# Altium schematic symbol library Schlib1.SchLib: 108 symbols (part 2 of 2)
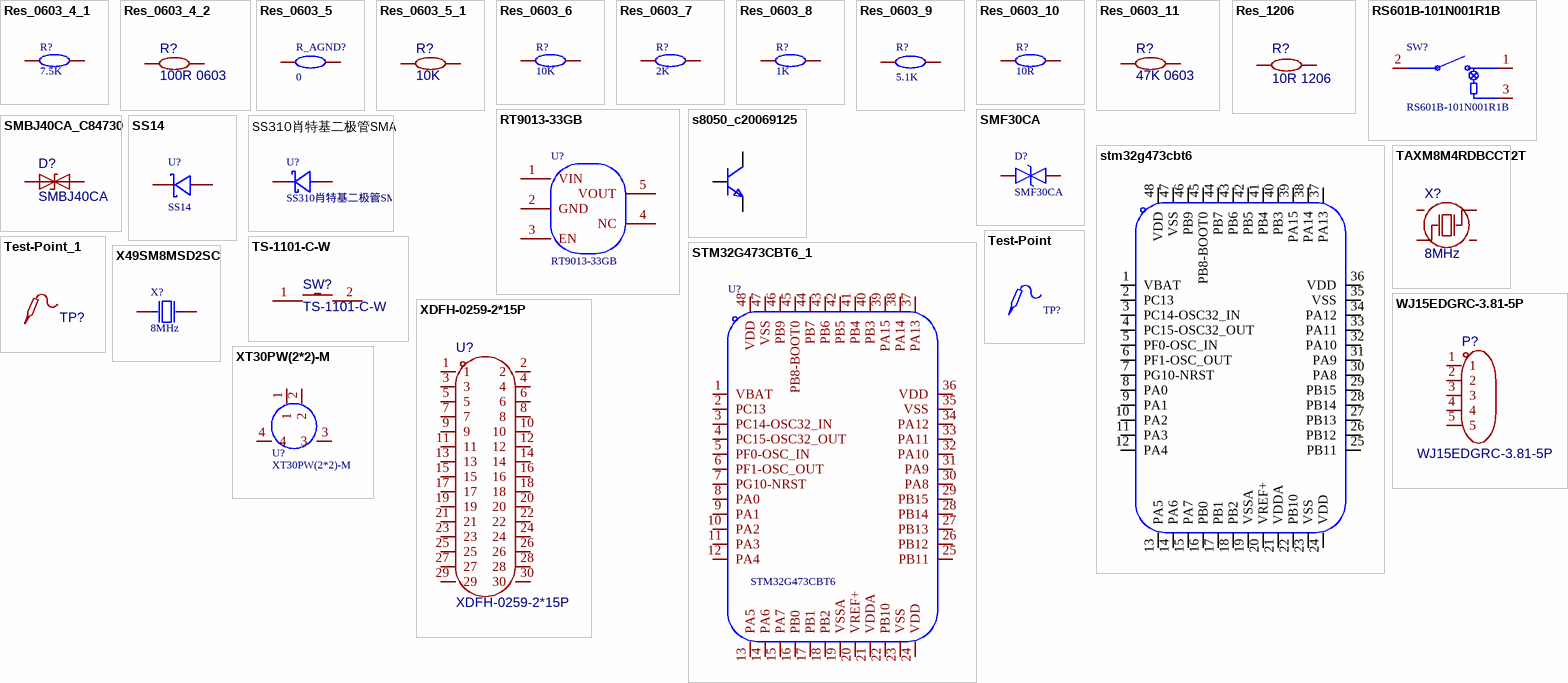
[diagram p3: symbols Res_0603_4_1 to XT30PW(2*2)-M]

## Res_0603_4_2
designator R?, comment 100R 0603
Symbol: 电阻; Device: Res_0603; ConvertToPcb: yes; ModelId: fc143cca1e79419f9cd78b61e9279f08; ModelName: R0603; ModelTransform: 31.8897,63.7794,0,90,0,0,0,0,0; Value: 100R 0603; AddInBom: yes; Supplier Footprint: 0603; FootprintName: R0603
footprint R0603
pins: 1, 2

## Res_0603_5
designator R_AGND?, comment 0
Symbol: 电阻; Device: Res_0603; 3D Model: fc143cca1e79419f9cd78b61e9279f08聨0819f05c4eef4c71ace90d822a990e87; 3D Model Transform: 31.8897,63.7794,0,90,0,0,0,0,0; ConvertToPcb: yes; ModelName: R0603; Supplier Footprint: 0603; Value: 0; AddInBom: yes; FootprintName: R0603
footprint R0603
3D model R0603
pins: 1, 2

## Res_0603_5_1
designator R?, comment 10K
Symbol: 电阻; Device: Res_0603; ConvertToPcb: yes; ModelId: fc143cca1e79419f9cd78b61e9279f08; ModelName: R0603; ModelTransform: 31.8897,63.7794,0,90,0,0,0,0,0; AddInBom: yes; Supplier Footprint: 0603; FootprintName: R0603; Value: 10K
footprint R0603
pins: 1, 2

## Res_0603_6
designator R?, comment 10K
Symbol: 电阻; Device: Res_0603; 3D Model: fc143cca1e79419f9cd78b61e9279f08聨0819f05c4eef4c71ace90d822a990e87; 3D Model Transform: 31.8897,63.7794,0,90,0,0,0,0,0; ConvertToPcb: yes; ModelName: R0603; Supplier Footprint: 0603; Value: 10K; AddInBom: yes; FootprintName: R0603
footprint R0603
3D model R0603
pins: 1, 2

## Res_0603_7
designator R?, comment 2K
Symbol: 电阻; Device: Res_0603; 3D Model: fc143cca1e79419f9cd78b61e9279f08聨0819f05c4eef4c71ace90d822a990e87; 3D Model Transform: 31.8897,63.7794,0,90,0,0,0,0,0; ConvertToPcb: yes; ModelName: R0603; Supplier Footprint: 0603; Value: 2K; AddInBom: yes; FootprintName: R0603
footprint R0603
3D model R0603
pins: 1, 2

## Res_0603_8
designator R?, comment 1K
Symbol: 电阻; Device: Res_0603; 3D Model: fc143cca1e79419f9cd78b61e9279f08聨0819f05c4eef4c71ace90d822a990e87; 3D Model Transform: 31.8897,63.7794,0,90,0,0,0,0,0; ConvertToPcb: yes; ModelName: R0603; Supplier Footprint: 0603; Value: 1K; AddInBom: yes; FootprintName: R0603
footprint R0603
3D model R0603
pins: 1, 2

## Res_0603_9
designator R?, comment 5.1K
Symbol: 电阻; Device: Res_0603; 3D Model: fc143cca1e79419f9cd78b61e9279f08聨0819f05c4eef4c71ace90d822a990e87; 3D Model Transform: 31.8897,63.7794,0,90,0,0,0,0,0; ConvertToPcb: yes; ModelName: R0603; Supplier Footprint: 0603; Value: 5.1K; AddInBom: yes; FootprintName: R0603
footprint R0603
3D model R0603
pins: 1, 2

## Res_0603_10
designator R?, comment 10R
Symbol: 电阻; Device: Res_0603; 3D Model: fc143cca1e79419f9cd78b61e9279f08聨0819f05c4eef4c71ace90d822a990e87; 3D Model Transform: 31.8897,63.7794,0,90,0,0,0,0,0; ConvertToPcb: yes; ModelName: R0603; Supplier Footprint: 0603; Value: 10R; AddInBom: yes; FootprintName: R0603
footprint R0603
3D model R0603
pins: 1, 2

## Res_0603_11
designator R?, comment 47K 0603
Symbol: 电阻; Device: Res_0603; ConvertToPcb: yes; ModelId: fc143cca1e79419f9cd78b61e9279f08; ModelName: R0603; ModelTransform: 31.8897,63.7794,0,90,0,0,0,0,0; Value: 47K 0603; AddInBom: yes; Supplier Footprint: 0603; FootprintName: R0603
footprint R0603
pins: 1, 2

## Res_1206
designator R?, comment 10R 1206
Device: Res_1206; AddInBom: yes; SymbolName: 电阻; ModelId: 89a1f13db2384da588040e0b3c55bf66; ModelName: R1206_L3.2-W1.6-H0.6; ModelTransform: 125.984,62.992,0,0,0,0,0,0,0; Value: 10R 1206; Supplier Footprint: 1206; ConvertToPcb: yes; FootprintName: R1206
footprint R1206
pins: 1, 2

## RS601B-101N001R1B
designator SW?
带灯:-;引脚样式:焊片;额定电流:6A;额定电压(AC):250V;额定电压(DC):-;电路结构:单刀单掷;工作寿命:1万次;; Manufacturer: HCTL(华灿天禄); AddInBom: yes; ModelId: 7c41611d110e4d3795e593475e88af54聨0819f05c4eef4c71ace90d822a990e87; ModelName: SW-TH_RS601B-101N011R1B; ModelTransform: 842.738,590.55,0,0,0,0,0.001,0,-275.591; Switch Height: 14.2mm; Actuator Type: 凹面弯曲; Actuator Color: 红色; Current Rating: 6A; Voltage Rating (AC): 250V; Circuit: 单刀单掷; Life: 1万次; Actuator Identifier: - O; Symbol: RS601B-101N001R1B; Device: RS601B-101N001R1B; LCSC Part Name: RS601B-101N001R1B; SupplierPart: C2885786; ManufacturerPart: RS601B-101N001R1B; Supplier Footprint: 插件,21x15mm; JLCPCB Part Class: Extended Part; Datasheet: https://item.szlcsc.com/datasheet/RS601B-101N001R1B/3096688.html; Supplier: LCSC; ConvertToPcb: yes; FootprintName: SW-TH_RS601B-101N011R1B; Length: 21mm; Width: 15mm; With Lamp: -; Termination Style: 焊片; Voltage Rating (DC): -; Operating Temperature: -25℃~+85℃
footprint SW-TH_RS601B-101N011R1B
pins: 1, 2, 3

## RT9013-33GB
designator U?
输出极性:正极;工作电压:5.5V;输出电压:3.3V;输出电流:500mA;电源纹波抑制比(PSRR):50dB@(10kHz);输出类型:固定;; Manufacturer: RICHTEK(立锜); 3D Model: 0a2a1b8f50944f73965918ad6e5fe167聨0819f05c4eef4c71ace90d822a990e87; 3D Model Transform: 118.60433,114.173,0,90,0,0,0.0005,0.0005,0; Output Configuration: 正极; Voltage - Supply: 5.5V; Output Voltage: 3.3V; Output Current: 500mA; Voltage Dropout: 400mV@(500mA); standby current: 25uA; Noise: 30uVrms; Output Type: 固定; Number of Outputs: 1; AddInBom: yes; ModelName: SOT-23-5_L2.9-W1.6-H1.1-LS2.8-P0.95; Symbol: RT9013-33GB; Device: RT9013-33GB; LCSC Part Name: 3.3V 500mA 5.5V; Supplier Part: C47773; Manufacturer Part: RT9013-33GB; Supplier Footprint: SOT-23-5; JLCPCB Part Class: Extended Part; Datasheet: https://item.szlcsc.com/datasheet/RT9013-33GB/48778.html; Supplier: LCSC; Power Supply Rejection Ratio (PSRR): 50dB@(10kHz); Features: 使能控制；短路保护；过流保护；热关断; Operating Temperature: -40℃~+125℃@(Tj); ConvertToPcb: yes; FootprintName: SOT-23-5_L3.0-W1.7-P0.95-LS2.8-BL
footprint SOT-23-5_L3.0-W1.7-P0.95-LS2.8-BL
3D model SOT-23-5_L2.9-W1.6-H1.1-LS2.8-P0.95
pins: 1 VIN, 2 GND, 3 EN, 4 NC, 5 VOUT

## s8050_c20069125
designator Q??  (value not drawn)
晶体管类型:NPN;集电极电流(Ic):500mA;集射极击穿电压(Vceo):25V;耗散功率(Pd):300mW;直流电流增益(hFE):120;; Manufacturer: R+O(宏嘉诚); ManufacturerPart: S8050; AddInBom: yes; ModelId: 5504beb8757f4de79731898ec55d3e54; ModelName: SOT-23-3_L2.9-W1.3-P1.90-LS2.3-BR; ModelTransform: 114.173,90.551,0,90,0,0,0,0,0; type: NPN; Current - Collector(Ic): 500mA; Collector - Emitter Voltage VCEO: 25V; Pd - Power Dissipation: 300mW; DC Current Gain: 120; Transition frequency(fT): 100MHz; Current - Collector Cutoff: 100nA; Vce Saturation(VCE(sat)): 600mV; Emitter-Base Voltage(Vebo): 5V; Number: 1个NPN; Configuration: 独立式; Symbol: S8050_C20069125; LCSC Part Name: hFE:200-350，丝印:J3Y NPN 500mA 25V; SupplierPart: C20069125; Supplier Footprint: SOT-23; JLCPCB Part Class: Extended Part; Datasheet: https://item.szlcsc.com/datasheet/S8050/21397163.html; Supplier: LCSC; ConvertToPcb: yes; FootprintName: SOT-23-3_L2.9-W1.3-P1.90-LS2.3-BR; Operating Temperature: -55℃~+150℃
footprint SOT-23-3_L2.9-W1.3-P1.90-LS2.3-BR
pins: 1 B, 2 E, 3 C

## SMBJ40CA_C84730
designator D?, comment SMBJ40CA
极性:双向;反向截止电压(Vrwm):40V;钳位电压:64.5V;峰值脉冲电流(Ipp):9.3A;峰值脉冲功率(Ppp):600W@10/1000us;击穿电压:44.4V;; Manufacturer: Brightking(君耀电子); Symbol: SMBJ40CA-C84730; Device: SMBJ40CA_C84730; AddInBom: yes; ModelId: 07b8d28694b84373acb83e050c4644c9; ModelName: SMB_L4.6-W3.6-LS5.3-BI; ModelTransform: 212.598,141.732,0,0,0,0,0,0,0; Polarity: 双向; Reverse Stand-Off Voltage (Vrwm): 40V; Clamping Voltage: 64.5V; Peak Pulse Current (Ipp): 9.3A; Voltage - Breakdown: 44.4V; Reverse Leakage Current (Ir): 1uA; Type: TVS; LCSC Part Name: 双向TVS 40V截止 峰值脉冲电流：9.3A; SupplierPart: C84730; ManufacturerPart: SMBJ40CA; Supplier Footprint: SMB(DO-214AA); JLCPCB Part Class: 扩展库; Datasheet: https://item.szlcsc.com/datasheet/SMBJ40CA/85901.html; Supplier: LCSC; ConvertToPcb: yes; FootprintName: SMB_L4.6-W3.6-LS5.3-BI; Peak Pulse Power Dissipation (Ppp): 600W@10/1000us
footprint SMB_L4.6-W3.6-LS5.3-BI
pins: 1, 2

## SMF30CA
designator D?
反向截止电压(Vrwm):30V;最大钳位电压:48.4V;峰值脉冲电流(Ipp):4.2A;击穿电压:33.3V;; Manufacturer: AnBon(安邦); Symbol: SMF30CA_C435498; 3D Model: 8576f175c34f41329e79954aa68cc529聨0819f05c4eef4c71ace90d822a990e87; 3D Model Transform: 145.669,70.866,0,0,0,0,0,0,0; Reverse Stand-Off Voltage (Vrwm): 30V; Maximum Clamping Voltage: 48.4V; Peak Pulse Current (Ipp): 4.2A; Breakdown Voltage: 33.3V; Reverse Leakage Current (Ir): 5uA; Type: TVS; AddInBom: yes; ModelName: SOD-123_L2.7-W1.8-LS3.7-BI; Device: SMF30CA; LCSC Part Name: SMF30CA; Supplier Part: C435498; Manufacturer Part: SMF30CA; Supplier Footprint: SOD-123; JLCPCB Part Class: Extended Part; Datasheet: https://atta.szlcsc.com/upload/public/pdf/source/20191009/C435508_DB7B75E48DB0811659B52C5D7F67F4F0.pdf; Supplier: LCSC; ConvertToPcb: yes; FootprintName: SOD-123_L2.7-W1.8-LS3.7-BI
footprint SOD-123_L2.7-W1.8-LS3.7-BI
3D model SOD-123_L2.7-W1.8-LS3.7-BI
pins: 1, 2

## SS14
designator U?
Symbol: SS14_C9900017063; 3D Model: 0f2f330c645944df9245ac3c3fec3456聨0819f05c4eef4c71ace90d822a990e87; 3D Model Transform: 98.425,49.2125,0,0,0,0,0,0,0; AddInBom: yes; ModelName: SOD-323_L1.7-W1.3-LS2.5-FD; Device: SS14; LCSC Part Name: SS14; Supplier Part: C9900017063; Manufacturer Part: SS14; Supplier Footprint: SOD-323; JLCPCB Part Class: Extended Part; Supplier: LCSC; ConvertToPcb: yes; FootprintName: SOD-323_L1.7-W1.3-LS2.5-RD
footprint SOD-323_L1.7-W1.3-LS2.5-RD
3D model SOD-323_L1.7-W1.3-LS2.5-FD
pins: 1 K, 2 A

## SS310肖特基二极管SMA
designator U?
3D Model: 6890bb9641474820a71fce2135ca3aaa聨0819f05c4eef4c71ace90d822a990e87; 3D Model Transform: 194.8815,98.425,0,0,0,0,0,0,0; AddInBom: yes; ModelName: SMA_L4.3-W2.6-LS5.1-R-RD; Symbol: SS310肖特基二极管SMA; Device: SS310肖特基二极管SMA; LCSC Part Name: SS310肖特基二极管SMA; Supplier Part: C9900014981; Manufacturer Part: SS310肖特基二极管SMA; Supplier Footprint: SS310SMA110V; JLCPCB Part Class: Extended Part; Supplier: LCSC; ConvertToPcb: yes; FootprintName: SMA_L4.3-W2.6-LS5.1-R-RD
footprint SMA_L4.3-W2.6-LS5.1-R-RD
3D model SMA_L4.3-W2.6-LS5.1-R-RD
pins: 1 A, 2 K

## stm32g473cbt6
designator U??  (value not drawn)
CPU内核:ARM Cortex-M4;CPU最大主频:170MHz;CPU位数:32 Bit;; Manufacturer: ST(意法半导体); AddInBom: yes; ModelId: 093be70396ff421eb2cdb946d5311efc; ModelName: LQFP-48_L7.0-W7.0-H1.4-LS9.0-P0.50; ModelTransform: 354.331,354.331,0,0,0,0,0,0,0; CPU Maximum Speed: 170MHz; Core Size: 32 Bit; Program Storage Size: 128KB; Program Memory Type: FLASH; Number of I/O: 38; Oscillator Type: 内置+外置; Voltage - Supply: 1.71V~3.6V; Symbol: STM32G473CBT6; LCSC Part Name: 带DSP和FPU的170MHz主流ARM Cortex-M4 MCU，具有128 KB Flash存储器、数学加速器和高模拟电平集成; SupplierPart: C730111; ManufacturerPart: STM32G473CBT6; Supplier Footprint: LQFP-48(7x7); JLCPCB Part Class: Extended Part; Datasheet: https://item.szlcsc.com/datasheet/STM32G473CBT6/778066.html; Supplier: LCSC; ConvertToPcb: yes; FootprintName: LQFP-48_L7.0-W7.0-P0.50-LS9.0-BL; CPU Core: ARM Cortex-M4; RAM Size: 128KB; EEPROM: -; Operating Temperature: -40℃~+85℃
footprint LQFP-48_L7.0-W7.0-P0.50-LS9.0-BL
pins: 1 VBAT, 2 PC13, 3 PC14-OSC32_IN, 4 PC15-OSC32_OUT, 5 PF0-OSC_IN, 6 PF1-OSC_OUT, 7 PG10-NRST, 8 PA0, 9 PA1, 10 PA2, 11 PA3, 12 PA4, 13 PA5, 14 PA6, 15 PA7, 16 PB0, 17 PB1, 18 PB2, 19 VSSA, 20 VREF+, 21 VDDA, 22 PB10, 23 VSS, 24 VDD, 25 PB11, 26 PB12, 27 PB13, 28 PB14, 29 PB15, 30 PA8, 31 PA9, 32 PA10, 33 PA11, 34 PA12, 35 VSS, 36 VDD, 37 PA13, 38 PA14, 39 PA15, 40 PB3, 41 PB4, 42 PB5, 43 PB6, 44 PB7, 45 PB8-BOOT0, 46 PB9, 47 VSS, 48 VDD

## STM32G473CBT6_1
designator U?, comment STM32G473CBT6
CPU内核:ARM Cortex-M4;CPU最大主频:170MHz;CPU位数:32 Bit;; Manufacturer: ST(意法半导体); 3D Model: 093be70396ff421eb2cdb946d5311efc聨0819f05c4eef4c71ace90d822a990e87; 3D Model Transform: 354.331,354.331,0,0,0,0,0,0,0; CPU Maximum Speed: 170MHz; Core Size: 32 Bit; Program Storage Size: 128KB; Program Memory Type: FLASH; Number of I/O: 38; Oscillator Type: 内置+外置; Voltage - Supply: 1.71V~3.6V; AddInBom: yes; ModelName: LQFP-48_L7.0-W7.0-H1.4-LS9.0-P0.50; Symbol: STM32G473CBT6; Device: STM32G473CBT6; LCSC Part Name: 带DSP和FPU的170MHz主流ARM Cortex-M4 MCU，具有128 KB Flash存储器、数学加速器和高模拟电平集成; Supplier Part: C730111; Manufacturer Part: STM32G473CBT6; Supplier Footprint: LQFP-48(7x7); JLCPCB Part Class: Extended Part; Datasheet: https://item.szlcsc.com/datasheet/STM32G473CBT6/778066.html; Supplier: LCSC; CPU Core: ARM Cortex-M4; RAM Size: 128KB; EEPROM: -; Operating Temperature: -40℃~+85℃; ConvertToPcb: yes; FootprintName: LQFP-48_L7.0-W7.0-P0.50-LS9.0-BL
footprint LQFP-48_L7.0-W7.0-P0.50-LS9.0-BL
3D model LQFP-48_L7.0-W7.0-H1.4-LS9.0-P0.50
pins: 1 VBAT, 2 PC13, 3 PC14-OSC32_IN, 4 PC15-OSC32_OUT, 5 PF0-OSC_IN, 6 PF1-OSC_OUT, 7 PG10-NRST, 8 PA0, 9 PA1, 10 PA2, 11 PA3, 12 PA4, 13 PA5, 14 PA6, 15 PA7, 16 PB0, 17 PB1, 18 PB2, 19 VSSA, 20 VREF+, 21 VDDA, 22 PB10, 23 VSS, 24 VDD, 25 PB11, 26 PB12, 27 PB13, 28 PB14, 29 PB15, 30 PA8, 31 PA9, 32 PA10, 33 PA11, 34 PA12, 35 VSS, 36 VDD, 37 PA13, 38 PA14, 39 PA15, 40 PB3, 41 PB4, 42 PB5, 43 PB6, 44 PB7, 45 PB8-BOOT0, 46 PB9, 47 VSS, 48 VDD

## TAXM8M4RDBCCT2T
designator X?, comment 8MHz
晶振类型:贴片晶振;频率:8MHz;常温频差:±10ppm;外接负载电容:10pF;频率稳定度(全温):±15ppm;; Manufacturer: YJX(雅晶鑫); Symbol: TAXM8M4RDBCCT2T; AddInBom: yes; ModelId: ae22b8d143894765bc8100c37cb6356f; ModelName: OSC-SMD_4P-L3.2-W2.5-H1.0; ModelTransform: 125.984,98.425,0,0,0,0,0,0,0; Crystal Type: 贴片晶振; Normal temperature Frequency Tolerance: ±10ppm; External load capacitor: 10pF; Frequency Stability(Full temperature range): ±15ppm; Equivalent Series Resistance (ESR): 250Ω; Device: TAXM8M4RDBCCT2T; LCSC Part Name: 8MHz ±10ppm 10pF; SupplierPart: C400090; ManufacturerPart: TAXM8M4RDBCCT2T; Supplier Footprint: SMD3225-4P; JLCPCB Part Class: 扩展库; Datasheet: https://atta.szlcsc.com/upload/public/pdf/source/20190626/C400090_CF95B89E745AFE4EF2E392EF8AC009D6.pdf; Supplier: LCSC; ConvertToPcb: yes; FootprintName: OSC-SMD_4P-L3.2-W2.5-BL; Value: 8MHz; Operating Temperature: -40℃~+85℃
footprint OSC-SMD_4P-L3.2-W2.5-BL
pins: 1, 2, 3, 4

## Test-Point
designator TP?
Test Point 测试点; Symbol: Test-Point; AddInBom: yes; Device: Test-Point; ConvertToPcb: yes; FootprintName: Test-Point-0.5mm
footprint Test-Point-0.5mm
pins: 1

## Test-Point_1
designator TP?
Test Point 测试点; Device: Test-Point; AddInBom: yes; ConvertToPcb: yes; SymbolName: Test-Point; FootprintName: Test-Point-0.5mm
footprint Test-Point-0.5mm
pins: 1

## TS-1101-C-W
designator SW?
电路结构:单刀单掷;按钮形状:矩形按钮;作用力:260gf;安装方式:立贴;开关长度:6mm;开关宽度:3.6mm;开关高度:2.5mm;带支架:不带;触点电流:50mA;额定电压(AC):-;额定电压(DC):12V;额定功率:-;绝缘电阻:-;带灯:无;机械寿命:5万次;; Manufacturer: XKB Connectivity(中国星坤); AddInBom: yes; ModelId: b2f4ea9f0afc4b0786d53dba66ceb9e4; ModelName: SW-SMD_L6.0-W3.3-H5-LS8.0; ModelTransform: 314.96,129.921,0,0,0,0,0,0,0; Circuit: 单刀单掷; Actuator Style: 矩形按钮; Operating Force: 260gf; Switch Length: 6mm; Switch Width: 3.6mm; Switch Height: 2.5mm; Strike Gundam: 不带; Contact Current: 50mA; Voltage Rating (DC): 12V; Actuator/Cap Color: 白色带淡绿; With Lamp: 无; Mechanical Life: 5万次; Symbol: TS-1101-C-W; Device: TS-1101-C-W; LCSC Part Name: 6*3.6*2.5mm 立贴 轻触开关; SupplierPart: C318938; ManufacturerPart: TS-1101-C-W; Supplier Footprint: SMD; JLCPCB Part Class: 扩展库; Datasheet: https://atta.szlcsc.com/upload/public/pdf/source/20200227/C318938_C2E53B1EEDE37D980A33616AC086DE53.pdf; Supplier: LCSC; ConvertToPcb: yes; FootprintName: SW-SMD_L6.0-W3.3-LS8.0; Mounting Style: 立贴; Voltage Rating (AC): -; Power Rating: -; Insulation Resistance: -; IP Rating: -; Pin Style: -; Operating Temperature: -30℃~+85℃
footprint SW-SMD_L6.0-W3.3-LS8.0
pins: 1, 2

## WJ15EDGRC-3.81-5P
designator P?
连接器类型:板端/插座-闭口;固定方式:-;结构:1x5P;间距:3.81mm;颜色:-;安装方式:弯针;排数:1;每排PIN数:5;额定电流:-;额定电压:-;线规 - AWG:-;线规 - 平方毫米:-;工作温度:-40℃~+105℃;; Manufacturer: KANGNEX(康奈克斯电气); AddInBom: yes; ModelId: 1f5bfc586d7a497a94e16b2138b9ad12; ModelName: CONN-TH_WJ3.81-WI-5P; ModelTransform: 784.64406,360.2355,0,0,0,0,-0.197,-118.11,-137.795; Number of Positions or Pins: 1x5P; Pitch: 3.81mm; Number of PINs Per Row: 5; Symbol: WJ15EDGRC-3.81-5P; Device: WJ15EDGRC-3.81-5P; LCSC Part Name: 1x5P 3.81mm 排数:1 每排P数:5; SupplierPart: C8395; ManufacturerPart: WJ15EDGRC-3.81-5P; Supplier Footprint: 弯插,P=3.81mm; JLCPCB Part Class: 扩展库; Datasheet: https://item.szlcsc.com/datasheet/WJ15EDGRC-3.81-5P/8889.html; Supplier: LCSC; ConvertToPcb: yes; FootprintName: CONN-TH_5P-P3.81_WJ15EDGRC-3.81-5P; Connector Type: 板端/插座-闭口; Termination Style: -; Color: -; Mounting Type: 弯针; Number of Pins: 5P; Number of Rows: 1; Current Rating: -; Voltage Rating (Max): -; Wire Gauge - AWG: -; Wire Gauge - mm2: -; Operating Temperature: -40℃~+105℃; Connection Type: -; Outlet Direction (Vertical Basis): -
footprint CONN-TH_5P-P3.81_WJ15EDGRC-3.81-5P
pins: 1, 2, 3, 4, 5

## X49SM8MSD2SC
designator X?, comment 8MHz
晶振类型:贴片晶振;频率:8MHz;常温频差:±20ppm;负载电容:20pF;频率稳定度:±30ppm;; Manufacturer: YXC(扬兴晶振); Symbol: X49SM8MSD2SC; 3D Model: 6f569b91267b44029b8615eb5c810fba聨0819f05c4eef4c71ace90d822a990e87; 3D Model Transform: 499.999,188.976,0,180,0,0,0.002,-0.002,0; Normal temperature Frequency Tolerance: ±20ppm; Load Capacitance: 20pF; Frequency Stability: ±30ppm; AddInBom: yes; ModelName: HC-49S_L11.4-W1.8-H3.0-LS12.7; Device: X49SM8MSD2SC; LCSC Part Name: HC-49SMD 8MHZ 20PF ±20PPM -20~70℃（±30PPM）; Supplier Part: C12674; Manufacturer Part: X49SM8MSD2SC; Supplier Footprint: HC-49S-SMD; JLCPCB Part Class: Basic Part; Datasheet: https://item.szlcsc.com/datasheet/X49SM8MSD2SC/13310.html; Supplier: LCSC; Type: 贴片晶振; Value: 8MHz; Operating Temperature: -20℃~+70℃; ConvertToPcb: yes; FootprintName: CRYSTAL-SMD_L11.5-W4.8-LS12.7
footprint CRYSTAL-SMD_L11.5-W4.8-LS12.7
3D model HC-49S_L11.4-W1.8-H3.0-LS12.7
pins: 1 OSC1, 2 OSC2

## XDFH-0259-2*15P
designator U?
连接器类型:简牛座;间距:2.54mm;结构:2x15P;额定电流:3A;额定电压:500V;封装形式:弯插;排数:2;每排PIN数:15;触头材质:铜;触头镀层:金;工作温度范围:-45℃~+105℃;; Manufacturer: LX(连欣科技); AddInBom: yes; ModelId: 5c3b8136d5a14d27ae11c9ec27ec7f0d; ModelName: CONN-TH_30P-P2.54_LX_XDFH-0259-2X15P; ModelTransform: 1799.209,492.9124,0,0,0,0,0,185.039,-129.921; Connector Type: 简牛座; Pitch: 2.54mm; Number of Positions or Pins: 2x15P; Current Rating: 3A; Voltage Rating (Max): 500V; Holder Type: 弯插; Number of PINs Per Row: 15; Symbol: XDFH-0259-2*15P; Device: XDFH-0259-2*15P; LCSC Part Name: 2U镀金PH2.54MM-2*15PIN卧插简牛插座专用; SupplierPart: C19193828; ManufacturerPart: XDFH-0259-2*15P; Supplier Footprint: 弯插,P=2.54mm; JLCPCB Part Class: 扩展库; Datasheet: https://atta.szlcsc.com/upload/public/pdf/source/20231117/460E6BB7C0FB7D45FB9AB0ED1A0F90C2.pdf; Supplier: LCSC; ConvertToPcb: yes; FootprintName: CONN-TH_30P-P2.54_LX_XDFH-0259-2X15P; Number of Rows: 2; Contact Material: 铜; Contact Plating: 金; Operating Temperature: -45℃~+105℃
footprint CONN-TH_30P-P2.54_LX_XDFH-0259-2X15P
pins: 1, 2, 3, 4, 5, 6, 7, 8, 9, 10, 11, 12, 13, 14, 15, 16, 17, 18, 19, 20, 21, 22, 23, 24, 25, 26, 27, 28, 29, 30

## XT30PW(2*2)-M
designator U?
AddInBom: yes; ModelId: 722652c2597f41cd937322584dc4b29b聨0819f05c4eef4c71ace90d822a990e87; ModelName: CONN-TH_XT30PW-M; ModelTransform: 523.621,549.2115,0,0,0,0,-0.005,-39.568,-78.74; Symbol: XT30PW(2*2)-M; Device: XT30PW(2*2)-M; LCSC Part Name: XT30PW(2*2)-M; SupplierPart: C9900097120; ManufacturerPart: XT30PW(2*2)-M; Supplier Footprint: XT30PW(2*2)-M; JLCPCB Part Class: Extended Part; Supplier: LCSC; ConvertToPcb: yes; FootprintName: CONN-TH_XT30PW-M
footprint CONN-TH_XT30PW-M
pins: 1, 2, 3, 4